# Altium footprint library CHIP-Library.PcbLib: 345 footprints (part 8 of 22)
Each footprint in its own frame and in the unit in brackets; x right, y up, seen from the top. Pads: shape width x height; smd on the part's side, far side on the other; paste and mask are expansions set on the pad; w line width, h text height; cw(c..) or ccw(c..) is an arc to the next point about the centre after c.
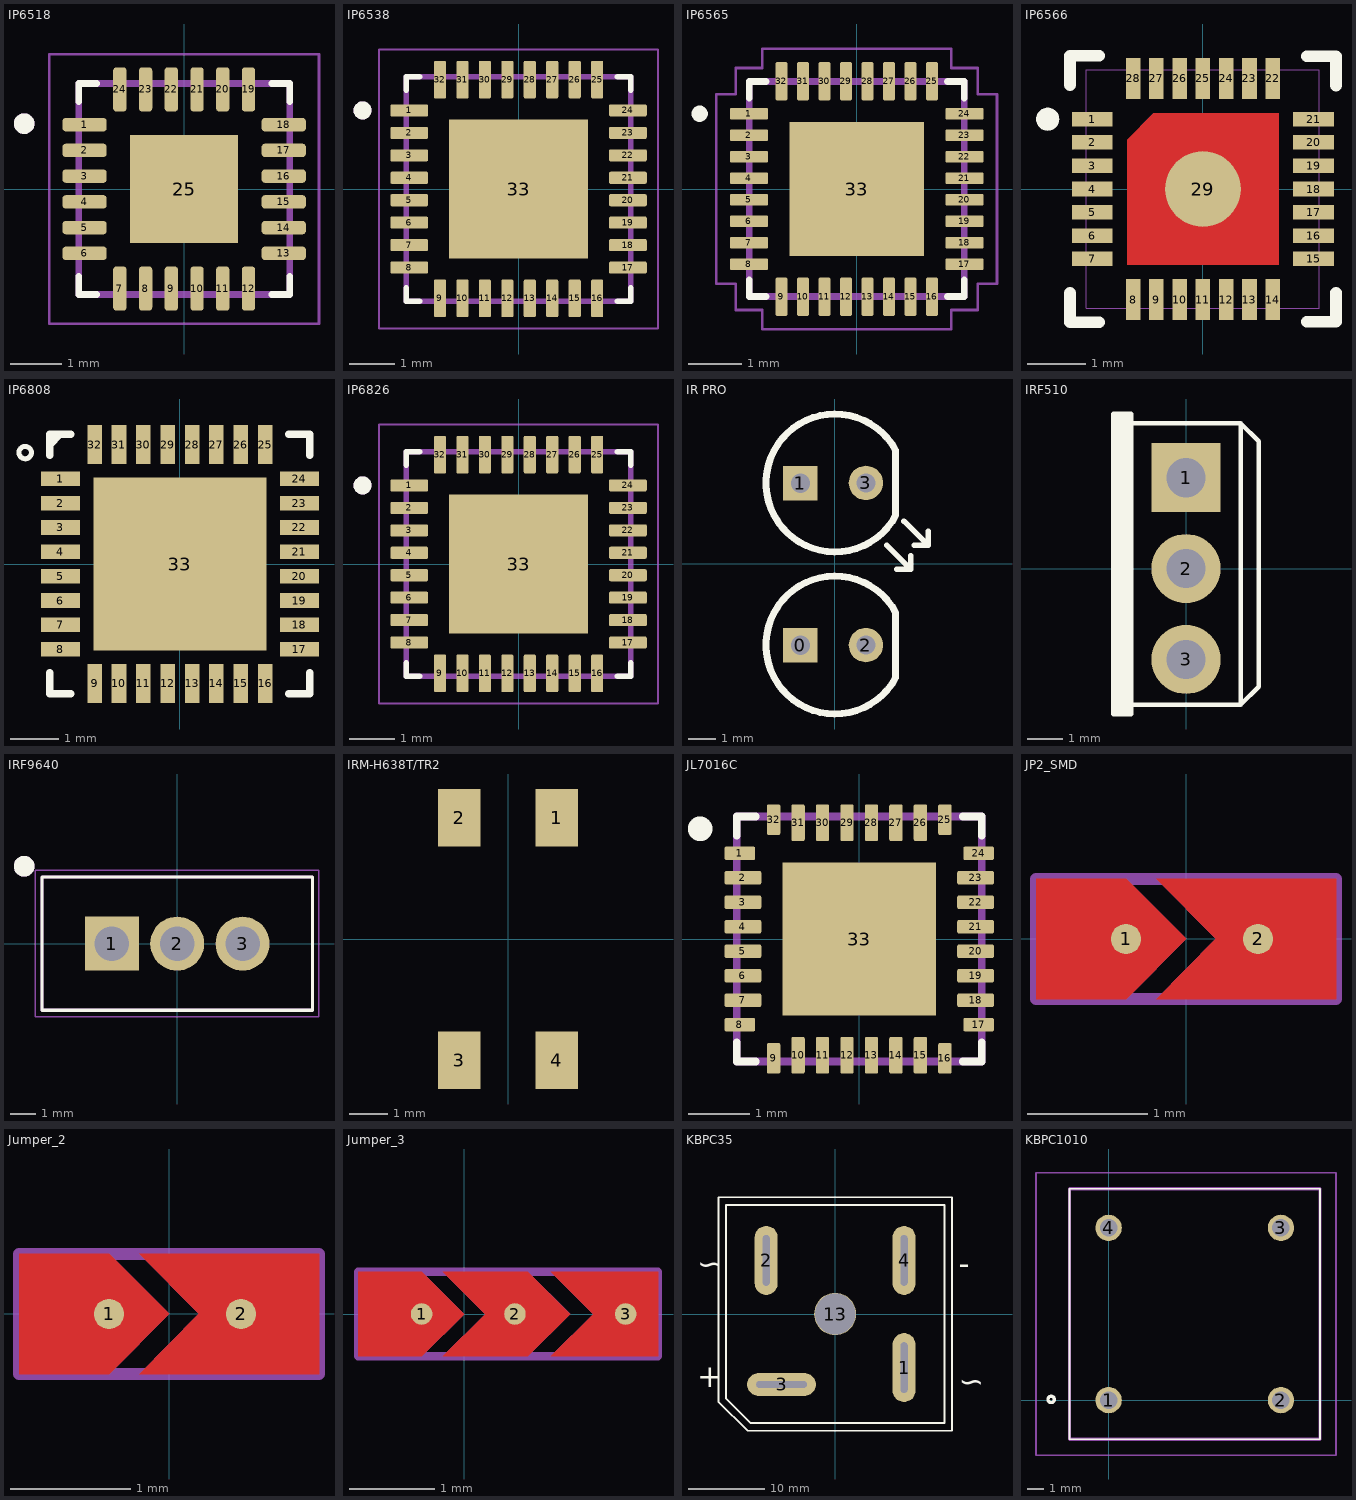
[diagram p7: the footprints below, top view; thin cyan lines are the x and y axes]

## IP6518 [mm] "DC DC 45W FAST CHAREGR TYPE C"
pads (25):
  rrect50% 0.86x0.26 smd: 1(-1.935,1.25) 2(-1.935,0.75) 3(-1.935,0.25) 4(-1.935,-0.25) 5(-1.935,-0.75) 6(-1.935,-1.25) 13(1.935,-1.25) 14(1.935,-0.75) 15(1.935,-0.25) 16(1.935,0.25) 17(1.935,0.75) 18(1.935,1.25)
  rrect50% 0.26x0.86 smd: 7(-1.25,-1.935) 8(-0.75,-1.935) 9(-0.25,-1.935) 10(0.25,-1.935) 11(0.75,-1.935) 12(1.25,-1.935) 19(1.25,1.935) 20(0.75,1.935) 21(0.25,1.935) 22(-0.25,1.935) 23(-0.75,1.935) 24(-1.25,1.935)
  rect 2.1x2.1 smd paste-2: 25(0,0)
Top Overlay:
  circle w0.2: c-3.11,1.27 r0.1
  lines w0.127: -2.05,-1.7 -2.05,-2.05 -1.7,-2.05 ; -2.05,1.7 -2.05,2.05 -1.7,2.05 ; 1.7,-2.05 2.05,-2.05 2.05,-1.7 ; 1.7,2.05 2.05,2.05 2.05,1.7
Top Paste:
  region: 0.79,-0.79 0.13,-0.79 0.13,-0.13 0.79,-0.13
  region: -0.13,-0.79 -0.79,-0.79 -0.79,-0.13 -0.13,-0.13
  region: 0.79,0.13 0.13,0.13 0.13,0.79 0.79,0.79
  region: -0.13,0.13 -0.79,0.13 -0.79,0.79 -0.13,0.79
Mechanical 13:
  circle w0.2: c-3.11,1.27 r0.1
  lines w0.127: -2.05,-2.05 2.05,-2.05 2.05,2.05 -2.05,2.05 -2.05,-2.05
Mechanical 15:
  lines w0.05: -2.62,-2.62 2.62,-2.62 2.62,2.62 -2.62,2.62 -2.62,-2.62
3D body "User Library-QFN 24 4x4.step": height 0.91, standoff 0.01, extent -2.002,-2.002 2.002,2.002

## IP6538 [mm] "15w Wirless charger ic"
pads (33):
  rrect25% 0.84x0.27 smd mask-2539.97: 1(-2.435,1.75) 2(-2.435,1.25) 3(-2.435,0.75) 4(-2.435,0.25) 5(-2.435,-0.25) 6(-2.435,-0.75) 7(-2.435,-1.25) 8(-2.435,-1.75) 17(2.435,-1.75) 18(2.435,-1.25) 19(2.435,-0.75) 20(2.435,-0.25) 21(2.435,0.25) 22(2.435,0.75) 23(2.435,1.25) 24(2.435,1.75)
  rrect25% 0.27x0.84 smd mask-2539.97: 9(-1.75,-2.435) 10(-1.25,-2.435) 11(-0.75,-2.435) 12(-0.25,-2.435) 13(0.25,-2.435) 14(0.75,-2.435) 15(1.25,-2.435) 16(1.75,-2.435) 25(1.75,2.435) 26(1.25,2.435) 27(0.75,2.435) 28(0.25,2.435) 29(-0.25,2.435) 30(-0.75,2.435) 31(-1.25,2.435) 32(-1.75,2.435)
  rect 3.1x3.1 smd paste-3: 33(0,0)
Top Overlay:
  circle w0.2: c-3.475,1.75 r0.1
  lines w0.127: -2.5,-2.205 -2.5,-2.5 -2.205,-2.5 ; -2.5,2.205 -2.5,2.5 -2.205,2.5 ; 2.205,-2.5 2.5,-2.5 2.5,-2.205 ; 2.205,2.5 2.5,2.5 2.5,2.205
Top Paste:
  region: 1.24,0.26 0.25,0.26 0.25,1.24 1.24,1.24
  region: -0.26,0.26 -1.25,0.26 -1.25,1.24 -0.26,1.24
  region: -0.26,-1.25 -1.25,-1.25 -1.25,-0.27 -0.26,-0.27
  region: 1.24,-1.25 0.25,-1.25 0.25,-0.27 1.24,-0.27
Top Solder:
  region: -1.95,-2.885 -1.95,-1.985 -1.55,-1.985 -1.55,-2.885
  region: -1.45,-2.885 -1.45,-1.985 -1.05,-1.985 -1.05,-2.885
  region: -0.95,-2.885 -0.95,-1.985 -0.55,-1.985 -0.55,-2.885
  region: -0.45,-2.885 -0.45,-1.985 -0.05,-1.985 -0.05,-2.885
  region: 0.05,-2.885 0.05,-1.985 0.45,-1.985 0.45,-2.885
  region: 0.55,-2.885 0.55,-1.985 0.95,-1.985 0.95,-2.885
  region: 1.05,-2.885 1.05,-1.985 1.45,-1.985 1.45,-2.885
  region: 1.55,-2.885 1.55,-1.985 1.95,-1.985 1.95,-2.885
  region: 1.55,1.985 1.55,2.885 1.95,2.885 1.95,1.985
  region: 1.05,1.985 1.05,2.885 1.45,2.885 1.45,1.985
  region: 0.55,1.985 0.55,2.885 0.95,2.885 0.95,1.985
  region: 0.05,1.985 0.05,2.885 0.45,2.885 0.45,1.985
  region: -0.45,1.985 -0.45,2.885 -0.05,2.885 -0.05,1.985
  region: -0.95,1.985 -0.95,2.885 -0.55,2.885 -0.55,1.985
  region: -1.45,1.985 -1.45,2.885 -1.05,2.885 -1.05,1.985
  region: -1.95,1.985 -1.95,2.885 -1.55,2.885 -1.55,1.985
  region: -2.885,1.55 -2.885,1.95 -1.985,1.95 -1.985,1.55
  region: -2.885,1.05 -2.885,1.45 -1.985,1.45 -1.985,1.05
  region: -2.885,0.55 -2.885,0.95 -1.985,0.95 -1.985,0.55
  region: -2.885,0.05 -2.885,0.45 -1.985,0.45 -1.985,0.05
  region: -2.885,-0.45 -2.885,-0.05 -1.985,-0.05 -1.985,-0.45
  region: -2.885,-0.95 -2.885,-0.55 -1.985,-0.55 -1.985,-0.95
  region: -2.885,-1.45 -2.885,-1.05 -1.985,-1.05 -1.985,-1.45
  region: -2.885,-1.95 -2.885,-1.55 -1.985,-1.55 -1.985,-1.95
  region: 1.985,-1.95 1.985,-1.55 2.885,-1.55 2.885,-1.95
  region: 1.985,-1.45 1.985,-1.05 2.885,-1.05 2.885,-1.45
  region: 1.985,-0.95 1.985,-0.55 2.885,-0.55 2.885,-0.95
  region: 1.985,-0.45 1.985,-0.05 2.885,-0.05 2.885,-0.45
  region: 1.985,0.05 1.985,0.45 2.885,0.45 2.885,0.05
  region: 1.985,0.55 1.985,0.95 2.885,0.95 2.885,0.55
  region: 1.985,1.05 1.985,1.45 2.885,1.45 2.885,1.05
  region: 1.985,1.55 1.985,1.95 2.885,1.95 2.885,1.55
Top Courtyard:
  lines w0.1: 2.5,-2.51 -2.49,-2.51 -2.5,-2.5 -2.5,2.5 -2.49,2.51 2.49,2.51 2.5,2.5 2.5,-2.509 ; 2.5,-2.509 2.5,-2.51
Mechanical 13:
  circle w0.2: c-3.475,1.75 r0.1
  lines w0.127: -2.5,-2.5 2.5,-2.5 2.5,2.5 -2.5,2.5 -2.5,-2.5
Mechanical 15:
  lines w0.05: -3.105,-3.105 3.105,-3.105 3.105,3.105 -3.105,3.105 -3.105,-3.105
3D body "User Library-qfn32-5x5.step": height 0.8, standoff 0, extent -2.52,-2.51 2.5,2.51

## IP6565 [mm] "QFN32 4*4"
height 4.32
pads (33):
  rrect25% 0.71x0.22 smd mask-2539.97: 1(-2.005,1.4) 2(-2.005,1) 3(-2.005,0.6) 4(-2.005,0.2) 5(-2.005,-0.2) 6(-2.005,-0.6) 7(-2.005,-1) 8(-2.005,-1.4) 17(2.005,-1.4) 18(2.005,-1) 19(2.005,-0.6) 20(2.005,-0.2) 21(2.005,0.2) 22(2.005,0.6) 23(2.005,1) 24(2.005,1.4)
  rrect25% 0.22x0.71 smd mask-2539.97: 9(-1.4,-2.005) 10(-1,-2.005) 11(-0.6,-2.005) 12(-0.2,-2.005) 13(0.2,-2.005) 14(0.6,-2.005) 15(1,-2.005) 16(1.4,-2.005) 25(1.4,2.005) 26(1,2.005) 27(0.6,2.005) 28(0.2,2.005) 29(-0.2,2.005) 30(-0.6,2.005) 31(-1,2.005) 32(-1.4,2.005)
  rect 2.5x2.5 smd paste-2: 33(0,0)
Top Overlay:
  circle w0.2: c-2.921,1.4 r0.05
  lines w0.127: -2,-1.69 -2,-2 -1.69,-2 ; -2,1.69 -2,2 -1.69,2 ; 1.69,-2 2,-2 2,-1.69 ; 1.69,2 2,2 2,1.69
Top Paste:
  rectangle: -1.1,-1.1 -0.7,-0.7
  rectangle: -0.5,-1.1 -0.1,-0.7
  rectangle: 0.1,-1.1 0.5,-0.7
  rectangle: 0.7,-1.1 1.1,-0.7
  rectangle: -1.1,-0.5 -0.7,-0.1
  rectangle: -0.5,-0.5 -0.1,-0.1
  rectangle: 0.1,-0.5 0.5,-0.1
  rectangle: 0.7,-0.5 1.1,-0.1
  rectangle: -1.1,0.1 -0.7,0.5
  rectangle: -0.5,0.1 -0.1,0.5
  rectangle: 0.1,0.1 0.5,0.5
  rectangle: 0.7,0.1 1.1,0.5
  rectangle: -1.1,0.7 -0.7,1.1
  rectangle: -0.5,0.7 -0.1,1.1
  rectangle: 0.1,0.7 0.5,1.1
  rectangle: 0.7,0.7 1.1,1.1
Top Solder:
  region: 1.605,1.25 1.605,1.55 2.405,1.55 2.405,1.25
  region: 1.605,0.85 1.605,1.15 2.405,1.15 2.405,0.85
  region: 1.605,0.45 1.605,0.75 2.405,0.75 2.405,0.45
  region: 1.605,0.05 1.605,0.35 2.405,0.35 2.405,0.05
  region: 1.605,-0.35 1.605,-0.05 2.405,-0.05 2.405,-0.35
  region: 1.605,-0.75 1.605,-0.45 2.405,-0.45 2.405,-0.75
  region: 1.605,-1.55 1.605,-1.25 2.405,-1.25 2.405,-1.55
  region: 1.605,-1.15 1.605,-0.85 2.405,-0.85 2.405,-1.15
  region: 1.25,-2.405 1.25,-1.605 1.55,-1.605 1.55,-2.405
  region: 0.85,-2.405 0.85,-1.605 1.15,-1.605 1.15,-2.405
  region: 0.45,-2.405 0.45,-1.605 0.75,-1.605 0.75,-2.405
  region: 0.05,-2.405 0.05,-1.605 0.35,-1.605 0.35,-2.405
  region: -0.35,-2.405 -0.35,-1.605 -0.05,-1.605 -0.05,-2.405
  region: -0.75,-2.405 -0.75,-1.605 -0.45,-1.605 -0.45,-2.405
  region: -1.15,-2.405 -1.15,-1.605 -0.85,-1.605 -0.85,-2.405
  region: -1.55,-2.405 -1.55,-1.605 -1.25,-1.605 -1.25,-2.405
  region: -2.405,-1.55 -2.405,-1.25 -1.605,-1.25 -1.605,-1.55
  region: -2.405,-1.15 -2.405,-0.85 -1.605,-0.85 -1.605,-1.15
  region: -2.405,-0.75 -2.405,-0.45 -1.605,-0.45 -1.605,-0.75
  region: -2.405,-0.35 -2.405,-0.05 -1.605,-0.05 -1.605,-0.35
  region: -2.405,0.05 -2.405,0.35 -1.605,0.35 -1.605,0.05
  region: -2.405,0.45 -2.405,0.75 -1.605,0.75 -1.605,0.45
  region: -2.405,0.85 -2.405,1.15 -1.605,1.15 -1.605,0.85
  region: -2.405,1.25 -2.405,1.55 -1.605,1.55 -1.605,1.25
  region: -1.55,1.605 -1.55,2.405 -1.25,2.405 -1.25,1.605
  region: -1.15,1.605 -1.15,2.405 -0.85,2.405 -0.85,1.605
  region: -0.75,1.605 -0.75,2.405 -0.45,2.405 -0.45,1.605
  region: -0.35,1.605 -0.35,2.405 -0.05,2.405 -0.05,1.605
  region: 0.05,1.605 0.05,2.405 0.35,2.405 0.35,1.605
  region: 0.45,1.605 0.45,2.405 0.75,2.405 0.75,1.605
  region: 0.85,1.605 0.85,2.405 1.15,2.405 1.15,1.605
  region: 1.25,1.605 1.25,2.405 1.55,2.405 1.55,1.605
Top Courtyard:
  lines w0.02: -2,-2 -2,2 2,2 2,-2 -2,-2
Mechanical 13:
  lines w0.127: -2,-2 2,-2 2,2 -2,2 -2,-2
Mechanical 15:
  lines w0.05: -2.61,-1.76 -2.25,-1.76 -2.25,-2.25 -1.76,-2.25 -1.76,-2.61 1.76,-2.61 1.76,-2.25 2.25,-2.25 2.25,-1.76 2.61,-1.76 2.61,1.76 2.25,1.76 2.25,2.25 1.76,2.25 1.76,2.61 -1.76,2.61 -1.76,2.25 -2.25,2.25 -2.25,1.76 -2.61,1.76 -2.61,-1.76
3D body "step_temp.STEP": height 0.55, standoff 0, extent -2,-2 2,2

## IP6566 [mm]
height 4.32
pads (30):
  rect 0.7x0.25 smd mask+0.03: 1(-1.9,1.2) 2(-1.9,0.8) 3(-1.9,0.4) 4(-1.9,0) 5(-1.9,-0.4) 6(-1.9,-0.8) 7(-1.9,-1.2) 15(1.9,-1.2) 16(1.9,-0.8) 17(1.9,-0.4) 18(1.9,0) 19(1.9,0.4) 20(1.9,0.8) 21(1.9,1.2)
  rect 0.25x0.7 smd mask+0.03: 8(-1.2,-1.9) 9(-0.8,-1.9) 10(-0.4,-1.9) 11(0,-1.9) 12(0.4,-1.9) 13(0.8,-1.9) 14(1.2,-1.9) 22(1.2,1.9) 23(0.8,1.9) 24(0.4,1.9) 25(0,1.9) 26(-0.4,1.9) 27(-0.8,1.9) 28(-1.2,1.9)
  round 1.3 smd paste-2: 29(0,0)
  round 0.4 on Top Overlay: ""(-2.667,1.2)
Top Layer:
  region: -0.85,1.3 -1.3,0.85 -1.3,-1.3 1.3,-1.3 1.3,1.3
Top Overlay:
  lines w0.2: -2.282,-1.786 -2.282,-2.286 -1.782,-2.286 ; -2.282,1.786 -2.282,2.286 -1.782,2.286 ; 1.786,-2.282 2.286,-2.282 2.286,-1.782 ; 1.786,2.278 2.286,2.278 2.286,1.778
Top Paste:
  rectangle: -0.976,-0.949 -0.226,-0.249
  rectangle: -0.975,0.25 -0.225,0.95
  rectangle: 0.224,0.224 0.974,0.974
  rectangle: 0.225,-0.951 0.975,-0.251
Top Courtyard:
  lines w0.02: -2,-2.05 2,-2.05 2,2.05 -2,2.05 ; -2,-2.05 -2,-2.05 ; -2,-2.05 -2,2.05 ; -2,2.05 -2,2.05
3D body: height 0.75, standoff 0, extent -2,-2.05 2,2.05

## IP6808 [mm] "Wireless Power Transmitter  7.5W/10W   QFN32 5mm*5mm 0.5 pitch"
pads (33):
  rect 0.805x0.3 smd: 1(-2.452,1.75) 2(-2.452,1.25) 3(-2.452,0.75) 4(-2.452,0.25) 5(-2.452,-0.25) 6(-2.452,-0.75) 7(-2.452,-1.25) 8(-2.452,-1.75) 17(2.452,-1.75) 18(2.452,-1.25) 19(2.452,-0.75) 20(2.452,-0.25) 21(2.452,0.25) 22(2.452,0.75) 23(2.452,1.25) 24(2.452,1.75)
  rect 0.3x0.805 smd: 9(-1.75,-2.452) 10(-1.25,-2.452) 11(-0.75,-2.452) 12(-0.25,-2.452) 13(0.25,-2.452) 14(0.75,-2.452) 15(1.25,-2.452) 16(1.75,-2.452) 25(1.75,2.452) 26(1.25,2.452) 27(0.75,2.452) 28(0.25,2.452) 29(-0.25,2.452) 30(-0.75,2.452) 31(-1.25,2.452) 32(-1.75,2.452)
  rect 3.55x3.55 smd paste-3: 33(0,0)
Top Overlay:
  circle w0.102: c-3.175,2.286 r0.127
  lines w0.152: -2.667,-2.235 -2.667,-2.667 -2.235,-2.667 ; -2.667,2.235 -2.667,2.667 -2.235,2.667 ; -2.667,2.451 -2.451,2.667 ; 2.235,-2.667 2.667,-2.667 2.667,-2.235 ; 2.235,2.667 2.667,2.667 2.667,2.235
Top Paste:
  region: 1.675,-1.675 0.1,-1.675 0.1,-0.1 1.675,-0.1
  region: 1.675,0.1 0.1,0.1 0.1,1.675 1.675,1.675
  region: -0.1,-1.675 -1.675,-1.675 -1.675,-0.1 -0.1,-0.1
  region: -0.1,0.1 -1.675,0.1 -1.675,1.675 -0.1,1.675
3D body "User Library-qfn32-5x5.step": height 0.8, standoff 0, extent -2.51,-2.51 2.51,2.51

## IP6826 [mm] "15w Wirless charger ic"
pads (33):
  rrect25% 0.84x0.27 smd: 1(-2.435,1.75) 2(-2.435,1.25) 3(-2.435,0.75) 4(-2.435,0.25) 5(-2.435,-0.25) 6(-2.435,-0.75) 7(-2.435,-1.25) 8(-2.435,-1.75) 17(2.435,-1.75) 18(2.435,-1.25) 19(2.435,-0.75) 20(2.435,-0.25) 21(2.435,0.25) 22(2.435,0.75) 23(2.435,1.25) 24(2.435,1.75)
  rrect25% 0.27x0.84 smd: 9(-1.75,-2.435) 10(-1.25,-2.435) 11(-0.75,-2.435) 12(-0.25,-2.435) 13(0.25,-2.435) 14(0.75,-2.435) 15(1.25,-2.435) 16(1.75,-2.435) 25(1.75,2.435) 26(1.25,2.435) 27(0.75,2.435) 28(0.25,2.435) 29(-0.25,2.435) 30(-0.75,2.435) 31(-1.25,2.435) 32(-1.75,2.435)
  rect 3.1x3.1 smd paste-3: 33(0,0)
Top Overlay:
  circle w0.2: c-3.475,1.75 r0.1
  lines w0.127: -2.5,-2.205 -2.5,-2.5 -2.205,-2.5 ; -2.5,2.205 -2.5,2.5 -2.205,2.5 ; 2.205,-2.5 2.5,-2.5 2.5,-2.205 ; 2.205,2.5 2.5,2.5 2.5,2.205
Top Paste:
  region: 0.98,-0.98 -0.98,-0.98 -0.98,0.98 0.98,0.98
Mechanical 13:
  circle w0.2: c-3.475,1.75 r0.1
  lines w0.127: -2.5,-2.5 2.5,-2.5 2.5,2.5 -2.5,2.5 -2.5,-2.5
Mechanical 15:
  lines w0.05: -3.105,-3.105 3.105,-3.105 3.105,3.105 -3.105,3.105 -3.105,-3.105
3D body "User Library-qfn32-5x5.step": height 0.8, standoff 0, extent -2.52,-2.51 2.5,2.51

## IR PRO [mil]
pads (4):
  rect 50x50 hole 28: 0(-50,-118) 1(-50,117)
  round 50 hole 28: 2(45,-117.8) 3(45,117.2)
Top Overlay:
  lines w8: 75,27 110,-8 ; 90,-8 110,-8 ; 100,62 135,27 ; 110,12 110,-8 ; 115,27 135,27 ; 135,47 135,27
  lines w10: 88.1,-165.19 cw(c0.04,-117.8) 88.1,-70.42 88.1,-165.19 ; 88.1,69.81 cw(c0.04,117.2) 88.1,164.58 88.1,69.81

## IRF510 [mil]
pads (3):
  rect 76x76 hole 43.31: 1(0,100)
  round 76 hole 43.31: 2(0,0) 3(0,-100)
Top Overlay:
  region: -60,-160 -80,-160 -80,170 -60,170
  lines w5: -60,-150 -60,-160 -80,-160 -80,170 -60,170 -60,160 ; -60,-150 -60,160 ; -60,-150 60,-150 ; -60,160 60,160 ; 60,-150 80,-130 80,140 60,160 ; 60,-150 60,160
3D body "step_temp.STEP": height 781, standoff -401, extent -110,-200 65,197.5

## IRF9640 [mm]
pads (3):
  rect 2.1x2.1 hole 1.34: 1(-2.54,0)
  round 2.1 hole 1.34: 2(0,0) 3(2.54,0)
Top Overlay:
  circle w0.4: c-5.95,3.01 r0.2
  lines w0.127: -5.26,-2.59 5.26,-2.59 5.26,2.59 -5.26,2.59 -5.26,-2.59
Mechanical 13:
  circle w0.4: c-5.95,3.01 r0.2
  lines w0.127: -5.26,-2.59 5.26,-2.59 5.26,2.59 -5.26,2.59 -5.26,-2.59
Mechanical 15:
  lines w0.05: -5.51,-2.845 -5.51,2.845 5.51,2.845 5.51,-2.845 -5.51,-2.845
3D body "step_temp.STEP": height 19.84, standoff -10.19, extent -5.048,-1.778 5.048,2.667

## IRM-H638T/TR2 [mm]
pads (4):
  rect 1.1x1.5 smd: 1(1.27,3.15) 2(-1.27,3.15) 3(-1.27,-3.15) 4(1.27,-3.15)
3D body "IRM-H636.STEP": height 3.99, standoff -0.06, extent -2.643,-3.515 2.717,3.5

## JL7016C [mm] "QFN32 4*4"
height 4.32
pads (33):
  rrect25% 0.5x0.22 smd mask-2539.97: 1(-1.95,1.4) 8(-1.95,-1.4) 17(1.95,-1.4) 24(1.95,1.4)
  rrect25% 0.6x0.22 smd mask-2539.97: 2(-1.9,1) 3(-1.9,0.6) 4(-1.9,0.2) 5(-1.9,-0.2) 6(-1.9,-0.6) 7(-1.9,-1) 18(1.9,-1) 19(1.9,-0.6) 20(1.9,-0.2) 21(1.9,0.2) 22(1.9,0.6) 23(1.9,1)
  rrect25% 0.22x0.5 smd mask-2539.97: 9(-1.4,-1.95) 16(1.4,-1.95) 25(1.4,1.95) 32(-1.4,1.95)
  rrect25% 0.22x0.6 smd mask-2539.97: 10(-1,-1.9) 11(-0.6,-1.9) 12(-0.2,-1.9) 13(0.2,-1.9) 14(0.6,-1.9) 15(1,-1.9) 26(1,1.9) 27(0.6,1.9) 28(0.2,1.9) 29(-0.2,1.9) 30(-0.6,1.9) 31(-1,1.9)
  rect 2.5x2.5 smd paste-2: 33(0,0)
Top Overlay:
  circle w0.3: c-2.6,1.8 r0.05
  lines w0.127: -2,-1.69 -2,-2 -1.69,-2 ; -2,1.69 -2,2 -1.69,2 ; 1.69,-2 2,-2 2,-1.69 ; 1.69,2 2,2 2,1.69
Top Paste:
  rectangle: -1.1,-1.1 -0.7,-0.7
  rectangle: -0.5,-1.1 -0.1,-0.7
  rectangle: 0.1,-1.1 0.5,-0.7
  rectangle: 0.7,-1.1 1.1,-0.7
  rectangle: -1.1,-0.5 -0.7,-0.1
  rectangle: -0.5,-0.5 -0.1,-0.1
  rectangle: 0.1,-0.5 0.5,-0.1
  rectangle: 0.7,-0.5 1.1,-0.1
  rectangle: -1.1,0.1 -0.7,0.5
  rectangle: -0.5,0.1 -0.1,0.5
  rectangle: 0.1,0.1 0.5,0.5
  rectangle: 0.7,0.1 1.1,0.5
  rectangle: -1.1,0.7 -0.7,1.1
  rectangle: -0.5,0.7 -0.1,1.1
  rectangle: 0.1,0.7 0.5,1.1
  rectangle: 0.7,0.7 1.1,1.1
Top Solder:
  region: 1.25,1.65 1.25,2.25 1.55,2.25 1.55,1.65
  region: -1.55,1.65 -1.55,2.25 -1.25,2.25 -1.25,1.65
  region: 1.65,1.25 1.65,1.55 2.25,1.55 2.25,1.25
  region: 1.55,0.85 1.55,1.15 2.25,1.15 2.25,0.85
  region: 1.55,0.45 1.55,0.75 2.25,0.75 2.25,0.45
  region: 1.55,0.05 1.55,0.35 2.25,0.35 2.25,0.05
  region: 1.55,-0.35 1.55,-0.05 2.25,-0.05 2.25,-0.35
  region: 1.55,-0.75 1.55,-0.45 2.25,-0.45 2.25,-0.75
  region: 1.65,-1.55 1.65,-1.25 2.25,-1.25 2.25,-1.55
  region: 1.55,-1.15 1.55,-0.85 2.25,-0.85 2.25,-1.15
  region: 1.25,-2.25 1.25,-1.65 1.55,-1.65 1.55,-2.25
  region: 0.85,-2.25 0.85,-1.55 1.15,-1.55 1.15,-2.25
  region: 0.45,-2.25 0.45,-1.55 0.75,-1.55 0.75,-2.25
  region: 0.05,-2.25 0.05,-1.55 0.35,-1.55 0.35,-2.25
  region: -0.35,-2.25 -0.35,-1.55 -0.05,-1.55 -0.05,-2.25
  region: -0.75,-2.25 -0.75,-1.55 -0.45,-1.55 -0.45,-2.25
  region: -1.15,-2.25 -1.15,-1.55 -0.85,-1.55 -0.85,-2.25
  region: -1.55,-2.25 -1.55,-1.65 -1.25,-1.65 -1.25,-2.25
  region: -1.15,1.55 -1.15,2.25 -0.85,2.25 -0.85,1.55
  region: -0.75,1.55 -0.75,2.25 -0.45,2.25 -0.45,1.55
  region: -0.35,1.55 -0.35,2.25 -0.05,2.25 -0.05,1.55
  region: 0.05,1.55 0.05,2.25 0.35,2.25 0.35,1.55
  region: 0.45,1.55 0.45,2.25 0.75,2.25 0.75,1.55
  region: 0.85,1.55 0.85,2.25 1.15,2.25 1.15,1.55
  region: -2.25,-1.55 -2.25,-1.25 -1.65,-1.25 -1.65,-1.55
  region: -2.265,-1.15 -2.265,-0.85 -1.535,-0.85 -1.535,-1.15
  region: -2.265,-0.75 -2.265,-0.45 -1.535,-0.45 -1.535,-0.75
  region: -2.265,-0.35 -2.265,-0.05 -1.535,-0.05 -1.535,-0.35
  region: -2.265,0.05 -2.265,0.35 -1.535,0.35 -1.535,0.05
  region: -2.265,0.45 -2.265,0.75 -1.535,0.75 -1.535,0.45
  region: -2.265,0.85 -2.265,1.15 -1.535,1.15 -1.535,0.85
  region: -2.25,1.25 -2.25,1.55 -1.65,1.55 -1.65,1.25
Top Courtyard:
  lines w0.02: -2,-2 -2,2 2,2 2,-2 -2,-2
Mechanical 13:
  lines w0.127: -2,-2 2,-2 2,2 -2,2 -2,-2
3D body "step_temp.STEP": height 0.55, standoff 0, extent -2,-2 2,2

## JP2_SMD [mil]
pads (2):
  round 10 smd paste-10 mask+3.94: 1(-19.68,0) 2(23.62,0)
Top Layer:
  region: -9.84,-19.69 49.21,-19.69 49.21,19.68 -9.84,19.68 9.84,0
  region: -19.68,19.68 -49.21,19.68 -49.21,-19.69 -19.68,-19.69 0,0
Top Solder:
  region: -49.21,-19.69 49.21,-19.69 49.21,19.68 -49.21,19.68
Mechanical 3:
  region: -9.84,-19.69 49.21,-19.69 49.21,19.68 -9.84,19.68 9.84,0
  region: -19.68,19.68 -49.21,19.68 -49.21,-19.69 -19.68,-19.69 0,0
Mechanical 4:
  lines w3.94: -49.21,-19.69 49.21,-19.69 49.21,19.68 -49.21,19.68 -49.21,-19.69

## Jumper_2 [mil]
pads (2):
  round 10 smd paste-10 mask+3.94: 1(-19.68,0) 2(23.62,0)
Top Layer:
  region: -19.68,19.68 -49.21,19.68 -49.21,-19.69 -19.68,-19.69 0,0
  region: -9.84,-19.69 49.21,-19.69 49.21,19.68 -9.84,19.68 9.84,0
Top Solder:
  region: -49.21,-19.69 49.21,-19.69 49.21,19.68 -49.21,19.68
Mechanical 3:
  region: -19.68,19.68 -49.21,19.68 -49.21,-19.69 -19.68,-19.69 0,0
  region: -9.84,-19.69 49.21,-19.69 49.21,19.68 -9.84,19.68 9.84,0
Mechanical 4:
  lines w3.94: -49.21,-19.69 -49.21,19.68 49.21,19.68 49.21,-19.69 -49.21,-19.69

## Jumper_3 [mil]
pads (3):
  round 10 smd paste-10 mask+3.94: 1(-19.68,0) 2(23.62,0) 3(75,0)
Top Layer:
  region: 40.31,-19.69 90,-19.69 90,19.68 40.31,19.68 60,0
  region: -19.68,19.68 -49.21,19.68 -49.21,-19.69 -19.68,-19.69 0,0
  region: -9.84,-19.69 29.53,-19.69 49.21,0 29.53,19.69 -9.84,19.68 9.84,0
Top Solder:
  region: -49.21,-19.69 90,-19.69 90,19.68 -49.21,19.68
Mechanical 3:
  region: 40.31,-19.69 90,-19.69 90,19.68 40.31,19.68 60,0
  region: -19.68,19.68 -49.21,19.68 -49.21,-19.69 -19.68,-19.69 0,0
  region: -9.84,-19.69 29.53,-19.69 49.22,0 29.53,19.69 -9.84,19.68 9.84,0
Mechanical 4:
  lines w3.94: -49.21,-19.69 -49.21,19.68 90,19.68 90,-19.69 -49.21,-19.69

## KBPC35 [mm]
pads (5):
  oval 3x9 hole 0.9 slot 6.6 at 90 deg: 1(9,-7) 2(-9,7) 4(9,7)
  oval 9x3 hole 0.9 slot 6.6 at 0 deg: 3(-7,-9.2)
  round 5.5 hole 5.3: 13(0,0)
Top Overlay:
  lines w0.254: -15.24,-11.43 -11.43,-15.24 15.24,-15.24 15.24,15.24 -15.24,15.24 -15.24,-11.43 ; -14.25,-11.023 -14.25,14.25 14.25,14.25 14.25,-14.25 -11.023,-14.25 -14.25,-11.023
  text "~" at -18.034,8.626 h5
  text "+" at -18.034,-6.015 h5
  text "~" at 16.129,-6.691 h5
  text "-" at 16.129,8.347 h5
3D body "KBPC3510.STEP": height 23.4, standoff 0, extent -14.275,-14.275 14.275,14.275

## KBPC1010 [mm]
pads (4):
  round 1.65 hole 1.1: 1(0,0) 2(10.8,0) 3(10.8,10.8) 4(0,10.8)
Top Overlay:
  lines w0.1: -2.45,-2.45 -2.45,13.25 13.25,13.25 13.25,-2.45 -2.45,-2.45
  lines w0.2: -3.6,-0.15 ccw(c-3.6,0.05) -3.6,0.25 ; -3.6,-0.15 cw(c-3.6,0.05) -3.6,0.25 ; -3.6,-0.15 ccw(c-3.6,0.05) -3.6,0.25
Mechanical 13:
  lines w0.2: -2.45,-2.45 -2.45,13.25 13.25,13.25 13.25,-2.45 -2.45,-2.45
Mechanical 15:
  lines w0.1: -4.55,-3.45 -4.55,14.25 14.25,14.25 14.25,-3.45 -4.55,-3.45
3D body "KBPC1010.stp": height 5.5, standoff -5, extent -2.45,-2.45 13.25,13.25